# Altium footprint library Footprints.PcbLib: 320 footprints (part 12 of 20)
Each footprint in its own frame and in the unit in brackets; x right, y up, seen from the top. Pads: shape width x height; smd on the part's side, far side on the other; paste and mask are expansions set on the pad; w line width, h text height; cw(c..) or ccw(c..) is an arc to the next point about the centre after c.
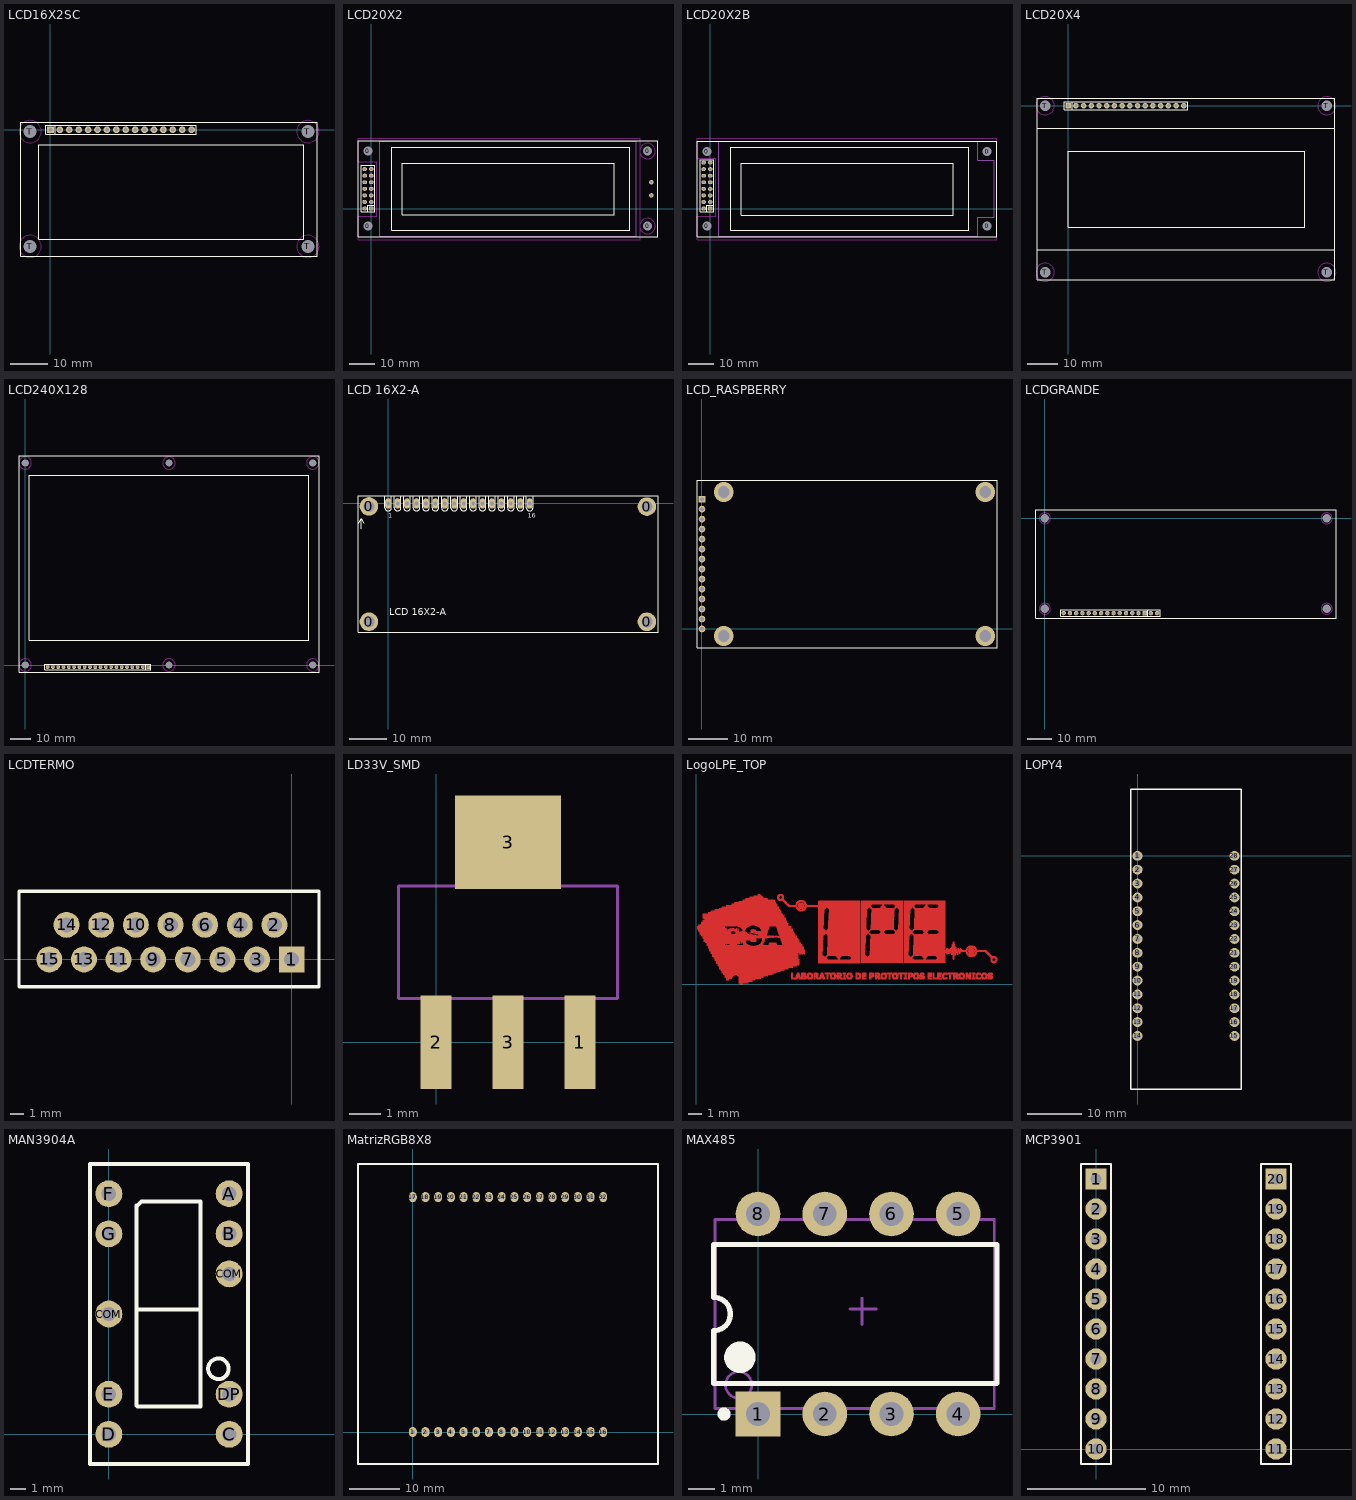
[diagram p11: the footprints below, top view; thin cyan lines are the x and y axes]

## LCD16X2SC [mm]
pads (20):
  rect 1.8x1.8 hole 1: 1(0,0)
  round 1.8 hole 1: 2(2.54,0) 3(5.08,0) 4(7.62,0) 5(10.16,0) 6(12.7,0) 7(15.24,0) 8(17.78,0) 9(20.32,0) 10(22.86,0) 11(25.4,0) 12(27.94,0) 13(30.48,0) 14(33.02,0) 15(35.56,0) 16(38.1,0)
  round 3 hole 3.5: T(-5.5,-31.5) T(-5.5,-0.5) T(69.5,-31.5) T(69.5,-0.5)
Top Overlay:
  lines w0.254: 1.27,-1.27 1.27,1.27 ; -8,-34.2 -8,2 72,2 72,-34.2 -8,-34.2 ; -3.2,-29.5 68.4,-29.5 68.4,-4 -3.2,-4 -3.2,-29.5 ; -1.27,-1.27 39.37,-1.27 39.37,1.27 -1.27,1.27 -1.27,-1.27
Keep-Out Layer:
  circle w0.254: c-5.5,-0.5 r3
  circle w0.254: c-5.5,-31.5 r3
  circle w0.254: c69.5,-0.5 r3
  circle w0.254: c69.5,-31.5 r3

## LCD20X2 [mm]
pads (20):
  round 3 hole 3.5: 0(-1.27,-6.8) 0(-1.27,22.2) 0(106.83,-6.8) 0(106.83,22.2)
  rect 1.8x1.5 hole 1: 1(0,0)
  oval 1.8x1.5 hole 1: 2(-2.54,0) 3(0,2.54) 4(-2.54,2.54) 5(0,5.08) 6(-2.54,5.08) 7(0,7.62) 8(-2.54,7.62) 9(0,10.16) 10(-2.54,10.16) 11(0,12.7) 12(-2.54,12.7) 13(0,15.24) 14(-2.54,15.24)
  round 1.7 hole 1: 15(108.3,10.16) 16(108.3,5.08)
Top Overlay:
  lines w0.254: -5.12,-10.88 110.88,-10.88 110.88,26.12 -5.12,26.12 -5.12,-10.88 ; 7.88,-8.38 99.88,-8.38 99.88,23.62 7.88,23.62 7.88,-8.38 ; 12,-2.5 12,17.5 94,17.5 94,-2.5 12,-2.5
  lines w0.305: -1.27,-1.27 -1.27,1.27 1.27,1.27 ; -3.81,-1.27 1.27,-1.27 1.27,16.65 -3.81,16.65 -3.81,-1.27
Keep-Out Layer:
  circle w0.254: c106.83,22.2 r3
  circle w0.254: c106.83,-6.8 r3
  lines w0.254: -5.1,-12 104,-12 104,27.1 -5,27.1 -5,18 2.2,18 2.2,-3 -5.1,-3 -5.1,-12
Mechanical 1:
  lines w0.254: 3.2,-10.8 3.2,26.1 102.5,26.1 102.5,-10.8 3.2,-10.8

## LCD20X2B [mm]
pads (20):
  round 3 hole 3.5: 0(-1.27,-6.8) 0(-1.27,22.04) 0(107.03,-6.8) 0(107.03,22.04)
  rect 1.8x1.5 hole 1: 1(0,0)
  oval 1.8x1.5 hole 1: 2(-2.54,0) 3(0,2.54) 4(-2.54,2.54) 5(0,5.08) 6(-2.54,5.08) 7(0,7.62) 8(-2.54,7.62) 9(0,10.16) 10(-2.54,10.16) 11(0,12.7) 12(-2.54,12.7) 13(0,15.24) 14(-2.54,15.24) 15(0,17.78) 16(-2.54,17.78)
Top Overlay:
  lines w0.254: -5.12,-10.88 110.88,-10.88 110.88,26.12 -5.12,26.12 -5.12,-10.88 ; 7.88,-8.38 7.88,23.62 99.88,23.62 99.88,-8.38 7.88,-8.38 ; 12,-2.5 12,17.5 94,17.5 94,-2.5 12,-2.5
  lines w0.305: -1.27,-1.27 -1.27,1.27 1.27,1.27 ; -3.81,-1.27 1.27,-1.27 1.27,18.95 -3.81,18.95 -3.81,-1.27
Keep-Out Layer:
  lines w0.254: 2.2,17.9 2.2,19.5 -5,19.5 -5,27.1 103.98,27.12 110.88,27.12 110.88,-11.88 110.76,-12 104,-12 -5.1,-12 -5.1,-3 2.2,-3 2.2,18
Mechanical 1:
  lines w0.254: 3.2,-10.8 3.2,26.1 103.4,26.1 103.4,18.62 109.88,18.62 109.88,-3.38 103.4,-3.38 103.4,-10.8 3.2,-10.8

## LCD20X4 [mm]
pads (20):
  rect 1.8x1.8 hole 1: 1(0,0)
  round 1.8 hole 1: 2(2.54,0) 3(5.08,0) 4(7.62,0) 5(10.16,0) 6(12.7,0) 7(15.24,0) 8(17.78,0) 9(20.32,0) 10(22.86,0) 11(25.4,0) 12(27.94,0) 13(30.48,0) 14(33.02,0) 15(35.56,0) 16(38.1,0)
  round 3 hole 3.5: T(-7.62,-54.92) T(-7.62,0) T(85.3,-54.92) T(85.3,0)
Top Overlay:
  lines w0.254: -10.16,-47.46 87.83,-47.46 ; -10.16,-7.46 87.84,-7.46 ; 1.27,-1.27 1.27,1.27 ; -10.16,-57.46 -10.16,2.54 49.84,2.54 87.84,2.54 87.84,-57.46 -10.16,-57.46 ; -1.27,-1.27 -1.27,1.27 39.37,1.27 39.37,-1.27 -1.27,-1.27 ; 0,-40 78,-40 78,-15 0,-15 0,-40
Keep-Out Layer:
  circle w0.254: c85.3,-54.92 r3
  circle w0.254: c85.3,0 r3
  circle w0.254: c-7.62,-54.92 r3
  circle w0.254: c-7.62,0 r3

## LCD240X128 [mm]
pads (26):
  round 3 hole 3.5: 0(0,0) 0(0,97) 0(69,0) 0(69,97) 0(138,0) 0(138,97)
  rect 1.8x1.8 hole 1: 1(59,-1)
  round 1.8 hole 1: 2(56.46,-1) 3(53.92,-1) 4(51.38,-1) 5(48.84,-1) 6(46.3,-1) 7(43.76,-1) 8(41.22,-1) 9(38.68,-1) 10(36.14,-1) 11(33.6,-1) 12(31.06,-1) 13(28.52,-1) 14(25.98,-1) 15(23.44,-1) 16(20.9,-1) 17(18.36,-1) 18(15.82,-1) 19(13.28,-1) 20(10.74,-1)
Top Overlay:
  lines w0.254: 57.73,-2.27 57.73,0.27 ; -3,-3.5 -3,100.5 141,100.5 141,-3.5 -3,-3.5 ; 2,11.8 136,11.8 136,91.2 2,91.2 2,11.8 ; 9.47,-2.27 60.27,-2.27 60.27,0.27 9.47,0.27 9.47,-2.27
Keep-Out Layer:
  circle w0.254: c69,97 r3
  circle w0.254: c69,0 r3
  circle w0.254: c138,97 r3
  circle w0.254: c0,97 r3
  circle w0.254: c138,0 r3
  circle w0.254: c0,0 r3

## LCD 16X2-A [mm] "Pantalla LCD 16 caracteres x 2 Lineas, conexion superior"
pads (20):
  round 5 hole 3: 0(-5.175,-31.825) 0(-5.175,-0.8) 0(69.65,-31.85) 0(69.65,-0.85)
  oval 1.6x2.8 hole 1: 1(0,0) 2(2.54,0) 3(5.08,0) 4(7.62,0) 5(10.16,0) 6(12.7,0) 7(15.24,0) 8(17.78,0) 9(20.32,0) 10(22.86,0) 11(25.4,0) 12(27.94,0) 13(30.48,0) 14(33.02,0) 15(35.56,0) 16(38.1,0)
Top Overlay:
  lines w0.127: -8.125,2.074 72.625,2.074 72.625,-34.675 -8.125,-34.675 -8.125,2.075 ; -7.874,-5.334 -7.239,-4.064 -6.604,-5.334 ; -7.239,-6.876 -7.239,-4.191 ; -0.889,2.075 -0.889,-1.143 ccw(c0,-1.143) 0.889,-1.143 0.889,2.05 ; 1.651,2.025 1.651,-1.143 ccw(c2.54,-1.143) 3.429,-1.143 3.429,2.05 ; 4.191,2.05 4.191,-1.143 ccw(c5.08,-1.143) 5.969,-1.143 5.969,2.05 ; 6.731,2.05 6.731,-1.143 ccw(c7.62,-1.143) 8.509,-1.143 8.509,2.05 ; 9.271,2.075 9.271,-1.143 ccw(c10.16,-1.143) 11.049,-1.143 11.049,2.075 ; 11.811,2.075 11.811,-1.143 ccw(c12.7,-1.143) 13.589,-1.143 13.589,2.025 ; 14.351,2.05 14.351,-1.143 ccw(c15.24,-1.143) 16.129,-1.143 16.129,2.075 ; 16.891,2.075 16.891,-1.143 ccw(c17.78,-1.143) 18.669,-1.143 18.669,2.07 ; 19.431,2.05 19.431,-1.143 ccw(c20.32,-1.143) 21.209,-1.143 21.209,2.05 ; 21.971,2.05 21.971,-1.143 ccw(c22.86,-1.143) 23.749,-1.143 23.749,2.05 ; 24.511,2.05 24.511,-1.143 ccw(c25.4,-1.143) 26.289,-1.143 26.289,2.075 ; 27.051,2.05 27.051,-1.143 ccw(c27.94,-1.143) 28.829,-1.143 28.829,2.075 ; 29.591,2.05 29.591,-1.143 ccw(c30.48,-1.143) 31.369,-1.143 31.369,2.05 ; 32.131,2.07 32.131,-1.143 ccw(c33.02,-1.143) 33.909,-1.143 33.909,2.025 ; 34.671,2.025 34.671,-1.143 ccw(c35.56,-1.143) 36.449,-1.143 36.449,2.025 ; 37.211,2.025 37.211,-1.143 ccw(c38.1,-1.143) 38.989,-1.143 38.989,2
  text "LCD 16X2-A" at 0.3,-30.125 h1.91
  text "16" at 37.592,-3.81 h1.27
  text "1" at 0,-3.81 h1.27
3D body: height 0, standoff 0, extent -8.189,-34.739 72.689,2.138

## LCD_RASPBERRY [mm]
pads (14):
  rect 1.7x1.7 hole 0.9: 1(0,33.02)
  round 1.7 hole 0.9: 2(0,30.48) 3(0,27.94) 4(0,25.4) 5(0,22.86) 6(0,20.32) 7(0,17.78) 8(0,15.24) 9(0,12.7) 10(0,10.16) 11(0,7.62) 12(0,5.08) 13(0,2.54) 14(0,0)
via 5.53,-1.77 diameter 5 hole 3
via 5.53,34.81 diameter 5 hole 3
via 72,-1.77 diameter 5 hole 3
via 72,34.81 diameter 5 hole 3
Top Overlay:
  lines w0.254: -1.27,-4.77 75,-4.77 75,37.81 -1.27,37.81 -1.27,33.02 -1.27,-4.77
3D body: height 0, standoff 0, extent -1.397,-4.897 75.127,37.937

## LCDGRANDE [mm]
pads (20):
  rect 1.8x1.8 hole 1: 1(40.72,-38.6)
  round 1.8 hole 1: 2(38.18,-38.6) 3(35.64,-38.6) 4(33.1,-38.6) 5(30.56,-38.6) 6(28.02,-38.6) 7(25.48,-38.6) 8(22.94,-38.6) 9(20.4,-38.6) 10(17.86,-38.6) 11(15.32,-38.6) 12(12.78,-38.6) 13(10.24,-38.6) 14(7.7,-38.6) 15(43.26,-38.6) 16(45.8,-38.6)
  round 1.8 hole 3.5: ""(0,-36.9) ""(0,0) ""(114.9,-36.9) ""(114.9,0)
Top Overlay:
  lines w0.254: 42,-39.87 42,-37.33 ; -3.6,-40.7 118.7,-40.7 118.7,3.5 -3.6,3.5 -3.6,-40.7 ; 6.43,-39.87 47.07,-39.87 47.07,-37.33 6.43,-37.33 6.43,-39.87
Keep-Out Layer:
  circle w0.254: c114.9,-36.9 r2.25
  circle w0.254: c114.9,0 r2.25
  circle w0.254: c0,-36.9 r2.25
  circle w0.254: c0,0 r2.25

## LCDTERMO [mm]
pads (15):
  rect 1.9x1.9 hole 1.1: 1(0,0)
  round 1.9 hole 1.1: 2(-1.27,2.54) 3(-2.54,0) 4(-3.81,2.54) 5(-5.08,0) 6(-6.35,2.54) 7(-7.62,0) 8(-8.89,2.54) 9(-10.16,0) 10(-11.43,2.54) 11(-12.7,0) 12(-13.97,2.54) 13(-15.24,0) 14(-16.51,2.54) 15(-17.78,0)
Top Overlay:
  lines w0.254: -20,-2 2,-2 2,5 -20,5 -20,-2

## LD33V_SMD [mm]
pads (4):
  rect 1x3 smd: 1(4.6,0) 2(0,0) 3(2.3,0)
  rect 3.4x3 smd: 3(2.3,6.4)
Mechanical 13:
  lines w0.1: -1.2,1.4 5.8,1.4 ; -1.2,1.41 -1.2,5 5.8,5 5.8,1.41
3D body: height 1.1, standoff 0, extent -1.2,1.41 5.8,5

## LogoLPE_TOP [mm] "Logo del laboratorio de prototipos electronicos"
Top Layer:
  drawing of 18492 lines, arcs and shapes, not listed

## LOPY4 [mm]
pads (28):
  round 1.8 hole 1.1: 1(0,0) 2(0,-2.54) 3(0,-5.08) 4(0,-7.62) 5(0,-10.16) 6(0,-12.7) 7(0,-15.24) 8(0,-17.78) 9(0,-20.32) 10(0,-22.86) 11(0,-25.4) 12(0,-27.94) 13(0,-30.48) 14(0,-33.02) 15(17.78,-33.02) 16(17.78,-30.48) 17(17.78,-27.94) 18(17.78,-25.4) 19(17.78,-22.86) 20(17.78,-20.32) 21(17.78,-17.78) 22(17.78,-15.24) 23(17.78,-12.7) 24(17.78,-10.16) 25(17.78,-7.62) 26(17.78,-5.08) 27(17.78,-2.54) 28(17.78,0)
Top Overlay:
  lines w0.254: -1.27,-42.74 19.05,-42.74 19.05,12.25 -1.27,12.25 -1.27,-42.74

## MAN3904A [mm]
pads (10):
  round 1.7 hole 0.9: A(7.62,15.24) B(7.62,12.7) C(7.62,0) COM(0,7.62) COM(7.62,10.16) D(0,0) DP(7.62,2.54) E(0,2.54) F(0,15.24) G(0,12.7)
Top Overlay:
  circle w0.254: c6.94,4.15 r0.652
  lines w0.254: 1.75,14.48 1.75,1.81 1.81,1.75 5.79,1.75 5.79,14.75 2.08,14.75 1.86,14.53 ; 1.8,7.92 5.63,7.92 ; -1.19,-1.88 -1.19,17.12 8.81,17.12 8.81,-1.88 -1.19,-1.88

## MatrizRGB8X8 [mm]
pads (32):
  oval 1.6x2 hole 0.8: 1(0,0) 2(2.54,0) 3(5.08,0) 4(7.62,0) 5(10.16,0) 6(12.7,0) 7(15.24,0) 8(17.78,0) 9(20.32,0) 10(22.86,0) 11(25.4,0) 12(27.94,0) 13(30.48,0) 14(33.02,0) 15(35.56,0) 16(38.1,0) 17(0,46.99) 18(2.54,46.99) 19(5.08,46.99) 20(7.62,46.99) 21(10.16,46.99) 22(12.7,46.99) 23(15.24,46.99) 24(17.78,46.99) 25(20.32,46.99) 26(22.86,46.99) 27(25.4,46.99) 28(27.94,46.99) 29(30.48,46.99) 30(33.02,46.99) 31(35.56,46.99) 32(38.1,46.99)
Top Overlay:
  lines w0.5: -10.95,-6.4 -10.95,53.6 49.05,53.6 49.05,-6.4 -10.95,-6.4

## MAX485 [mm]
pads (8):
  rect 1.7x1.7 hole 0.9: 1(0,0)
  round 1.7 hole 0.9: 2(2.54,0) 3(5.08,0) 4(7.62,0) 5(7.62,7.62) 6(5.08,7.62) 7(2.54,7.62) 8(0,7.62)
Top Overlay:
  circle w0.6: c-0.69,2.16 r0.3
  circle w0.25: c-1.3,0 r0.125
  lines w0.2: -1.69,1.16 9.1,1.16 9.1,6.46 -1.69,6.46 -1.69,4.445 cw(c-1.69,3.81) -1.69,3.175 -1.69,1.16
Mechanical 13:
  circle w0.1: c-0.74,1.11 r0.5
  lines w0.1: 9,0.2 9,7.4 ; 9,0.21 -1.64,0.21 -1.64,7.41 9,7.41
Mechanical 15:
  lines w0.1: 3.5,4 4.5,4 ; 3.96,3.41 3.96,4.41
3D body: height 5.34, standoff 0, extent -1.64,0.2 9,7.41

## MCP3901 [mm] "Connector; Header; 10 Position"
pads (20):
  rect 1.8x1.8 hole 0.9: 1(0,22.86) 20(15.24,22.86)
  round 1.8 hole 0.9: 2(0,20.32) 3(0,17.78) 4(0,15.24) 5(0,12.7) 6(0,10.16) 7(0,7.62) 8(0,5.08) 9(0,2.54) 10(0,0) 11(15.24,0) 12(15.24,2.54) 13(15.24,5.08) 14(15.24,7.62) 15(15.24,10.16) 16(15.24,12.7) 17(15.24,15.24) 18(15.24,17.78) 19(15.24,20.32)
Top Overlay:
  lines w0.2: -1.27,-1.27 1.27,-1.27 1.27,22.225 1.27,24.13 -1.27,24.13 -1.27,-1.27 ; 13.97,-1.27 16.51,-1.27 16.51,22.225 16.51,24.13 13.97,24.13 13.97,-1.27